# EAGLE library part FTSH-105-01-F-D-K (library Jlink-Connector)
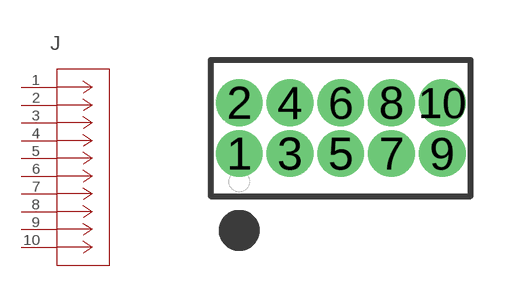
[diagram p0: symbol with the pads of CONN_FTSH-105-01-F-D-K_SAI; footprint CONN_FTSH-105-01-F-D-K_SAI]

Designator prefix J

## FTSH-105-01-F-D-K (COPYRIGHT: Copyright (C) 2022 Ultra Librarian. All rights reserved.; MANUFACTURER_PART_NUMBER: FTSH-105-01-F-D-K; MFR_NAME: Samtec Inc)  [CONN_FTSH-105-01-F-D-K_SAI]
1  1  pas
2  2  pas
3  3  pas
4  4  pas
5  5  pas
6  6  pas
7  7  pas
8  8  pas
9  9  pas
10  10  pas

## Footprint CONN_FTSH-105-01-F-D-K_SAI (pad centres in mm)
drill 0.66 pad 1.168: 1 0,0; 2 0,1.27; 3 1.27,0; 4 1.27,1.27; 5 2.54,0; 6 2.54,1.27; 7 3.81,0; 8 3.81,1.27; 9 5.08,0; 10 5.08,1.27